# Altium footprint library SYNCBOX_V3I1.PcbLib: 251 footprints (part 10 of 16)
Each footprint in its own frame and in the unit in brackets; x right, y up, seen from the top. Pads: shape width x height; smd on the part's side, far side on the other; paste and mask are expansions set on the pad; w line width, h text height; cw(c..) or ccw(c..) is an arc to the next point about the centre after c.
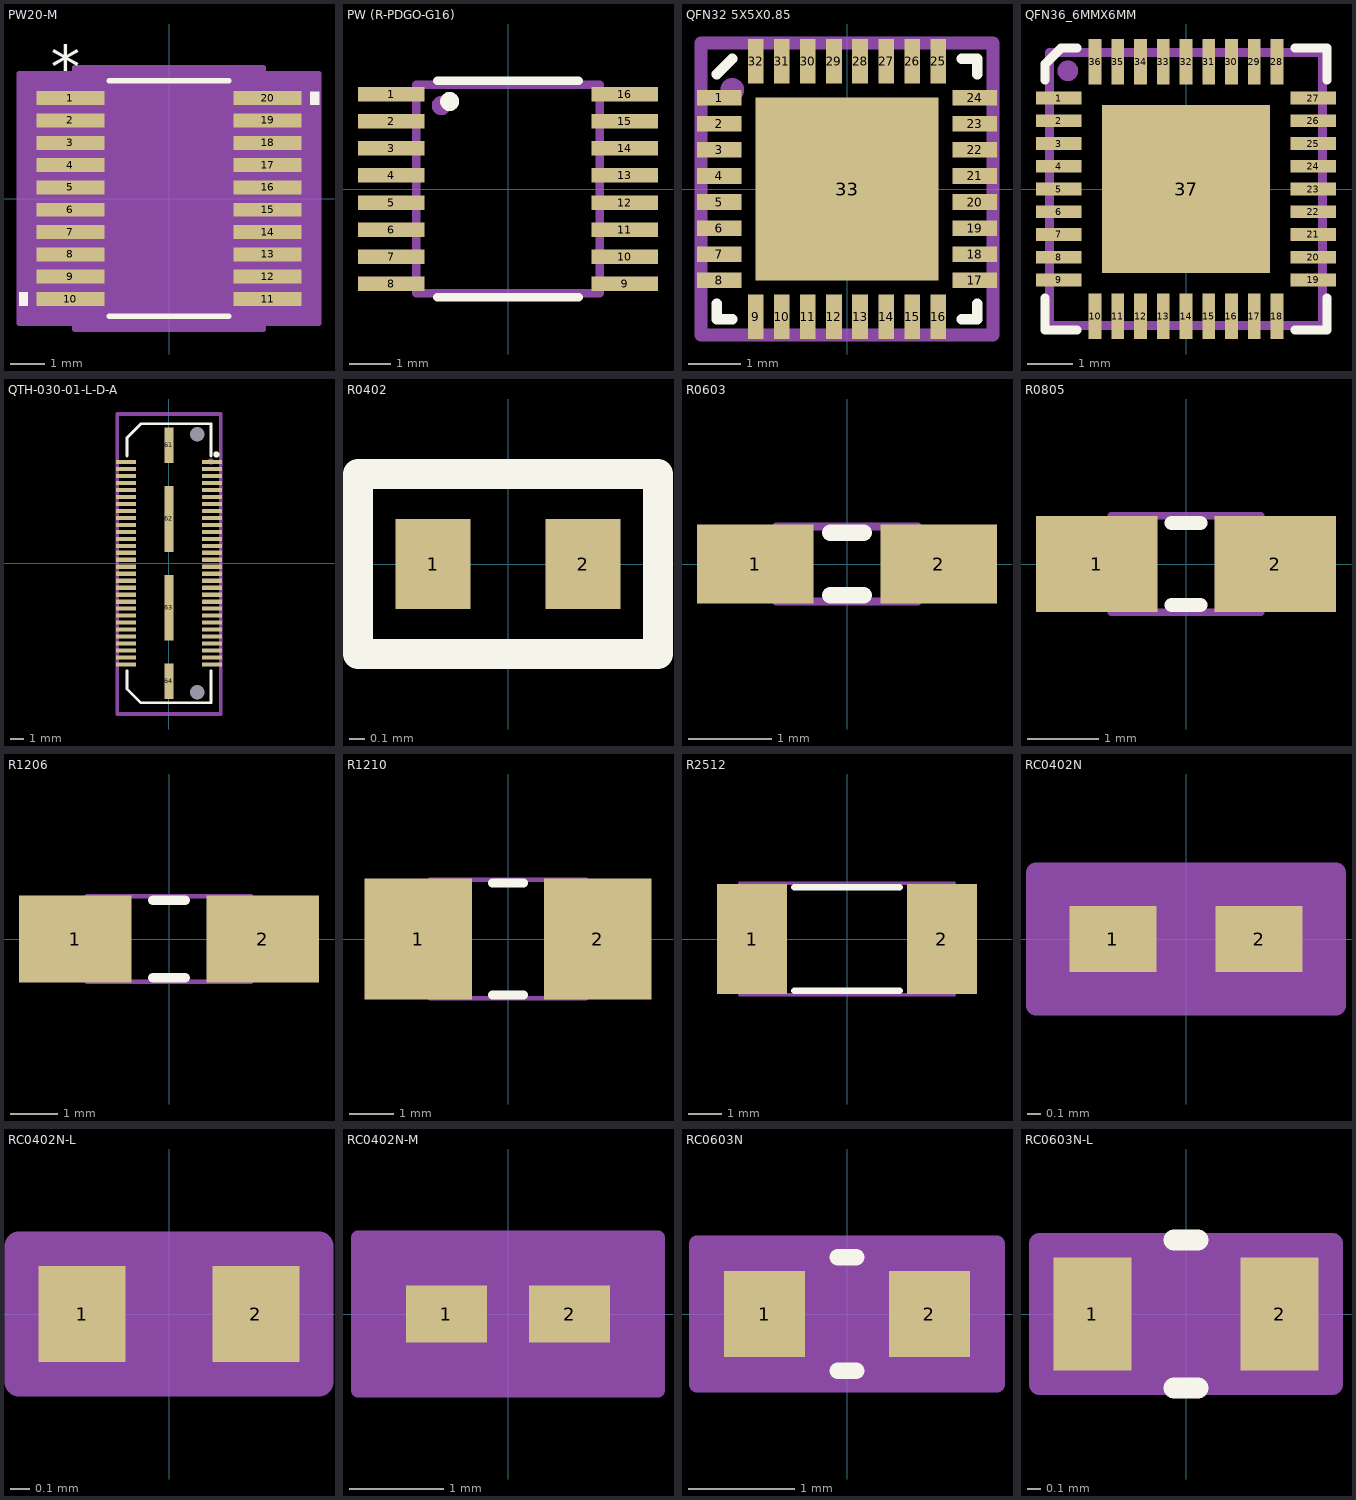
[diagram p9: the footprints below, top view; thin cyan lines are the x and y axes]

## PW20-M [mil]
pads (20):
  rect 78x16 smd paste+0 mask+0: 1(-113,115.16) 2(-113,89.57) 3(-113,63.98) 4(-113,38.39) 5(-113,12.8) 6(-113,-12.8) 7(-113,-38.39) 8(-113,-63.98) 9(-113,-89.57) 10(-113,-115.16) 11(113,-115.16) 12(113,-89.57) 13(113,-63.98) 14(113,-38.39) 15(113,-12.8) 16(113,12.8) 17(113,38.39) 18(113,63.98) 19(113,89.57) 20(113,115.16)
Top Overlay:
  region: -162,-107.66 -172,-107.66 -172,-122.66 -162,-122.66
  region: 162,122.66 172,122.66 172,107.66 162,107.66
  lines w6: -68.4,-135 68.4,-135 ; -68.4,135 68.4,135
  text "*" at -135.5,126.16 h50
Mechanical 13:
  lines w0: -12,130 ccw(c0,130) 12,130
  lines w1: -130,-121.16 -130,-109.16 -88.5,-109.16 -88.5,-121.16 -130,-121.16 ; -130,-95.57 -130,-83.57 -88.5,-83.57 -88.5,-95.57 -130,-95.57 ; -130,-69.98 -130,-57.98 -88.5,-57.98 -88.5,-69.98 -130,-69.98 ; -130,-44.39 -130,-32.39 -88.5,-32.39 -88.5,-44.39 -130,-44.39 ; -130,-18.8 -130,-6.8 -88.5,-6.8 -88.5,-18.8 -130,-18.8 ; -130,6.8 -130,18.8 -88.5,18.8 -88.5,6.8 -130,6.8 ; -130,32.39 -130,44.39 -88.5,44.39 -88.5,32.39 -130,32.39 ; -130,57.98 -130,69.98 -88.5,69.98 -88.5,57.98 -130,57.98 ; -130,83.57 -130,95.57 -88.5,95.57 -88.5,83.57 -130,83.57 ; -130,109.16 -130,121.16 -88.5,121.16 -88.5,109.16 -130,109.16 ; -88.5,-130 88.5,-130 88.5,130 -88.5,130 -88.5,-130 ; 88.5,-121.16 88.5,-109.16 130,-109.16 130,-121.16 88.5,-121.16 ; 88.5,-95.57 88.5,-83.57 130,-83.57 130,-95.57 88.5,-95.57 ; 88.5,-69.98 88.5,-57.98 130,-57.98 130,-69.98 88.5,-69.98 ; 88.5,-44.39 88.5,-32.39 130,-32.39 130,-44.39 88.5,-44.39 ; 88.5,-18.8 88.5,-6.8 130,-6.8 130,-18.8 88.5,-18.8 ; 88.5,6.8 88.5,18.8 130,18.8 130,6.8 88.5,6.8 ; 88.5,32.39 88.5,44.39 130,44.39 130,32.39 88.5,32.39 ; 88.5,57.98 88.5,69.98 130,69.98 130,57.98 88.5,57.98 ; 88.5,83.57 88.5,95.57 130,95.57 130,83.57 88.5,83.57 ; 88.5,109.16 88.5,121.16 130,121.16 130,109.16 88.5,109.16
  text "*" at -86,77 h50
Mechanical 15:
  region: -108.5,-143.16 -172,-143.16 -172,143.16 -108.5,143.16 -108.5,150 108.5,150 108.5,143.16 172,143.16 172,-143.16 108.5,-143.16 108.5,-150 -108.5,-150
  lines w6: -172,-143.16 -172,143.16 -108.5,143.16 -108.5,150 108.5,150 108.5,143.16 172,143.16 172,-143.16 108.5,-143.16 108.5,-150 -108.5,-150 -108.5,-143.16 -172,-143.16
3D body "PW20-M.step": height 47.09, standoff 0, extent -130,-130 130,130
3D body: height 10, standoff 0, extent 0,0 10,10

## PW (R-PDGO-G16) [mm]
pads (16):
  rect 1.6x0.35 smd mask+0.07: 1(-2.8,2.275) 2(-2.8,1.625) 3(-2.8,0.975) 4(-2.8,0.325) 5(-2.8,-0.325) 6(-2.8,-0.975) 7(-2.8,-1.625) 8(-2.8,-2.275) 9(2.8,-2.275) 10(2.8,-1.625) 11(2.8,-0.975) 12(2.8,-0.325) 13(2.8,0.325) 14(2.8,0.975) 15(2.8,1.625) 16(2.8,2.275)
Top Overlay:
  circle w0.254: c-1.4,2.1 r0.1
  lines w0.2: -1.7,-2.6 1.7,-2.6 ; -1.7,2.6 1.7,2.6
Mechanical 16:
  circle w0.254: c-1.6,2 r0.1
  lines w0.2: -2.2,-2.5 -2.2,2.5 2.2,2.5 2.2,-2.5 -2.2,-2.5
Mechanical 29:
  text ".Designator" at 0.7,0.5 h1
3D body "mtc16.stp": height 0.99, standoff -0.01, extent -3.198,-2.5 3.222,2.5

## QFN32 5X5X0.85 [mm]
pads (33):
  rect 0.85x0.3 smd mask+0.025: 1(-2.45,1.75) 2(-2.45,1.25) 3(-2.45,0.75) 4(-2.45,0.25) 5(-2.45,-0.25) 6(-2.45,-0.75) 7(-2.45,-1.25) 8(-2.45,-1.75) 17(2.45,-1.75) 18(2.45,-1.25) 19(2.45,-0.75) 20(2.45,-0.25) 21(2.45,0.25) 22(2.45,0.75) 23(2.45,1.25) 24(2.45,1.75)
  rect 0.3x0.85 smd mask+0.025: 9(-1.75,-2.45) 10(-1.25,-2.45) 11(-0.75,-2.45) 12(-0.25,-2.45) 13(0.25,-2.45) 14(0.75,-2.45) 15(1.25,-2.45) 16(1.75,-2.45) 25(1.75,2.45) 26(1.25,2.45) 27(0.75,2.45) 28(0.25,2.45) 29(-0.25,2.45) 30(-0.75,2.45) 31(-1.25,2.45) 32(-1.75,2.45)
  rect 3.5x3.5 smd paste-10 mask+0.025: 33(0,0)
Top Overlay:
  lines w0.2: -2.5,-2.2 -2.5,-2.5 -2.2,-2.5 ; -2.5,2.2 -2.2,2.5 ; 2.2,-2.5 2.5,-2.5 2.5,-2.2 ; 2.2,2.5 2.5,2.5 2.5,2.2
Top Paste:
  rectangle: -1.7,0.1 -0.1,1.7
  region: 0.1,1.7 0.1,0.1 1.7,0.1 1.7,1.7
  region: -0.1,-1.7 -0.1,-0.1 -1.7,-0.1 -1.7,-1.7
  region: 1.7,-0.1 0.1,-0.1 0.1,-1.7 1.7,-1.7
Mechanical 16:
  circle w0.254: c-2.2,1.9 r0.1
  lines w0.254: -2.8,-2.8 -2.8,2.8 2.8,2.8 2.8,-2.8 -2.8,-2.8
Mechanical 29:
  text ".Designator" at 0.5,-1.2 h1.2
3D body: height 0.9, standoff 0, extent -2.5,-2.5 2.5,2.5

## QFN36_6MMX6MM [mm]
pads (37):
  rect 1x0.28 smd mask+0.025: 1(-2.8,2) 2(-2.8,1.5) 3(-2.8,1) 4(-2.8,0.5) 5(-2.8,0) 6(-2.8,-0.5) 7(-2.8,-1) 8(-2.8,-1.5) 9(-2.8,-2) 19(2.8,-2) 20(2.8,-1.5) 21(2.8,-1) 22(2.8,-0.5) 23(2.8,0) 24(2.8,0.5) 25(2.8,1) 26(2.8,1.5) 27(2.8,2)
  rect 0.28x1 smd mask+0.025: 10(-2,-2.8) 11(-1.5,-2.8) 12(-1,-2.8) 13(-0.5,-2.8) 14(0,-2.8) 15(0.5,-2.8) 16(1,-2.8) 17(1.5,-2.8) 18(2,-2.8) 28(2,2.8) 29(1.5,2.8) 30(1,2.8) 31(0.5,2.8) 32(0,2.8) 33(-0.5,2.8) 34(-1,2.8) 35(-1.5,2.8) 36(-2,2.8)
  rect 3.7x3.7 smd paste-10 mask+0.025: 37(0,0)
Top Overlay:
  lines w0.2: -3.1,-2.4 -3.1,-3.1 -2.4,-3.1 ; -3.1,2.4 -3.1,2.75 -2.75,3.1 -2.4,3.1 ; 2.4,-3.1 3.1,-3.1 3.1,-2.4 ; 2.4,3.1 3.1,3.1 3.1,2.4
Top Paste:
  rectangle: -1.7,0.1 -0.1,1.7
  region: -0.1,-1.7 -0.1,-0.1 -1.7,-0.1 -1.7,-1.7
  region: 1.7,-0.1 0.1,-0.1 0.1,-1.7 1.7,-1.7
  region: 0.1,1.7 0.1,0.1 1.7,0.1 1.7,1.7
Mechanical 16:
  circle w0.254: c-2.6,2.6 r0.1
  lines w0.2: -3,-3 -3,3 3,3 3,-3 -3,-3
Mechanical 29:
  text ".Designator" at -1.2,-0.6 h1.2
3D body "QFN36 (6x6).step": height 0.9, standoff 0.01, extent -3.103,-3.103 3.102,3.102

## QTH-030-01-L-D-A [mm]
pads (66):
  rect 1.45x0.3 smd mask+0.025: 1(3.09,7.25) 2(-3.09,7.25) 3(3.09,6.75) 4(-3.09,6.75) 5(3.09,6.25) 6(-3.09,6.25) 7(3.09,5.75) 8(-3.09,5.75) 9(3.09,5.25) 10(-3.09,5.25) 11(3.09,4.75) 12(-3.09,4.75) 13(3.09,4.25) 14(-3.09,4.25) 15(3.09,3.75) 16(-3.09,3.75) 17(3.09,3.25) 18(-3.09,3.25) 19(3.09,2.75) 20(-3.09,2.75) 21(3.09,2.25) 22(-3.09,2.25) 23(3.09,1.75) 24(-3.09,1.75) 25(3.09,1.25) 26(-3.09,1.25) 27(3.09,0.75) 28(-3.09,0.75) 29(3.09,0.25) 30(-3.09,0.25) 31(3.09,-0.25) 32(-3.09,-0.25) 33(3.09,-0.75) 34(-3.09,-0.75) 35(3.09,-1.25) 36(-3.09,-1.25) 37(3.09,-1.75) 38(-3.09,-1.75) 39(3.09,-2.25) 40(-3.09,-2.25) 41(3.09,-2.75) 42(-3.09,-2.75) 43(3.09,-3.25) 44(-3.09,-3.25) 45(3.09,-3.75) 46(-3.09,-3.75) 47(3.09,-4.25) 48(-3.09,-4.25) 49(3.09,-4.75) 50(-3.09,-4.75) 51(3.09,-5.25) 52(-3.09,-5.25) 53(3.09,-5.75) 54(-3.09,-5.75) 55(3.09,-6.25) 56(-3.09,-6.25) 57(3.09,-6.75) 58(-3.09,-6.75) 59(3.09,-7.25) 60(-3.09,-7.25)
  rect 0.64x2.54 smd mask+0.025: 61(0,8.445) 64(0,-8.445)
  rect 0.64x4.7 smd mask+0.025: 62(0,3.175) 63(0,-3.175)
  round 0 hole 1.05 unplated: 65(2.03,-9.24) 66(2.03,9.24)
Top Overlay:
  circle w0.254: c3.4,7.8 r0.1
  lines w0.2: -3,-7.7 -3,-9 -2,-10 3,-10 3,-7.7 ; -3,7.7 -3,9 -2,10 3,10 3,7.7
Mechanical 16:
  circle w0.254: c3,7.3 r0.1
  lines w0.254: -3.7,-10.8 -3.7,10.7 3.7,10.7 3.7,-10.8 -3.7,-10.8
Mechanical 29:
  text ".Designator" at 1.2,0 h1.52
3D body "QTH-030-01-X-D-A.step": height 4.26, standoff -0.74, extent -3.55,-10.002 3.562,10

## R0402 [mm]
pads (2):
  rect 0.5x0.6 smd: 1(-0.5,0) 2(0.5,0)
Top Overlay:
  lines w0.2: -1,-0.6 -1,0.6 1,0.6 1,-0.6 -1,-0.6
Mechanical 16:
  lines w0.15: -1,-0.6 1,-0.6 1,0.6 -1,0.6 -1,-0.6
Mechanical 29:
  text ".Designator" at 2,0.2 h0.4
3D body "R0402.step": height 0.4, standoff 0, extent -0.5,-0.25 0.5,0.25

## R0603 [mm]
height 0.55
pads (2):
  rect 1.4x0.95 smd: 1(-1.1,0) 2(1.1,0)
Top Overlay:
  lines w0.2: -0.2,-0.375 0.2,-0.375 ; -0.2,0.375 0.2,0.375
Mechanical 13:
  lines w0.1: -0.85,-0.45 0.85,-0.45 0.85,0.45 -0.85,0.45 -0.85,-0.45
3D body: height 0.55, standoff 0, extent -0.85,-0.45 0.85,0.45

## R0805 [mm]
height 0.65
pads (2):
  rect 1.7x1.35 smd: 1(-1.25,0) 2(1.25,0)
Top Overlay:
  lines w0.2: -0.2,-0.575 0.2,-0.575 ; -0.2,0.575 0.2,0.575
Mechanical 13:
  lines w0.1: -1.05,-0.675 -1.05,0.675 1.05,0.675 1.05,-0.675 -1.05,-0.675
3D body: height 0.65, standoff 0, extent -1.05,-0.675 1.05,0.675

## R1206 [mm]
height 0.7
pads (2):
  rect 2.4x1.85 smd: 1(-2,0) 2(2,0)
Top Overlay:
  lines w0.2: -0.35,-0.825 0.35,-0.825 ; -0.35,0.825 0.35,0.825
Mechanical 13:
  lines w0.1: -1.75,-0.915 1.75,-0.915 1.75,0.915 -1.75,0.915 -1.75,-0.915
3D body: height 0.7, standoff 0, extent -1.75,-0.915 1.75,0.915

## R1210 [mm]
height 0.7
pads (2):
  rect 2.4x2.7 smd: 1(-2,0) 2(2,0)
Top Overlay:
  lines w0.2: -0.35,-1.25 0.35,-1.25 ; -0.35,1.25 0.35,1.25
Mechanical 13:
  lines w0.1: -1.75,-1.325 -1.75,1.325 1.75,1.325 1.75,-1.325 -1.75,-1.325
3D body: height 0.7, standoff 0, extent -1.75,-1.325 1.75,1.325

## R2512 [mm] "Chip Resistor, Body 6.3x3.2mm, IPC High Density"
height 0.7
pads (2):
  rect 2.1x3.3 smd: 1(-2.85,0) 2(2.85,0)
Top Overlay:
  lines w0.2: -1.575,-1.55 1.575,-1.55 ; -1.575,1.55 1.575,1.55
Mechanical 13:
  lines w0.1: -3.225,-1.675 -3.225,1.675 3.225,1.675 3.225,-1.675 -3.225,-1.675
3D body: height 0.9, standoff 0, extent -3.225,-1.675 3.225,1.675

## RC0402N [mm]
pads (2):
  rect 0.656x0.5 smd paste+0 mask+0: 1(-0.553,0) 2(0.553,0)
Mechanical 13:
  lines w0.025: -0.525,-0.25 -0.525,0.25 ; -0.525,-0.25 0.525,-0.25 ; -0.525,-0.25 -0.225,-0.25 -0.225,0.25 -0.525,0.25 ; -0.525,-0.25 -0.525,0.25 ; -0.525,0.25 0.525,0.25 ; 0.525,-0.25 0.525,0.25 ; 0.525,-0.25 0.525,0.25 ; 0.525,-0.25 0.225,-0.25 0.225,0.25 0.525,0.25
Mechanical 15:
  region: 1.135,-0.504 -1.135,-0.504 -1.135,0.504 1.135,0.504
  lines w0.152: -1.135,-0.504 1.135,-0.504 1.135,0.504 -1.135,0.504 -1.135,-0.504
3D body: height 0.25, standoff 0, extent 0,0 0.254,0.254
3D body "RC0402N.step": height 0.71, standoff 0, extent -0.525,-0.25 0.525,0.25

## RC0402N-L [mm]
pads (2):
  rect 0.452x0.5 smd paste+0 mask+0: 1(-0.451,0) 2(0.451,0)
Mechanical 13:
  lines w0.025: -0.525,-0.25 -0.525,0.25 ; -0.525,-0.25 0.525,-0.25 ; -0.525,-0.25 -0.225,-0.25 -0.225,0.25 -0.525,0.25 ; -0.525,-0.25 -0.525,0.25 ; -0.525,0.25 0.525,0.25 ; 0.525,-0.25 0.525,0.25 ; 0.525,-0.25 0.525,0.25 ; 0.525,-0.25 0.225,-0.25 0.225,0.25 0.525,0.25
Mechanical 15:
  region: 0.779,-0.352 -0.779,-0.352 -0.779,0.352 0.779,0.352
  lines w0.152: -0.779,-0.352 0.779,-0.352 0.779,0.352 -0.779,0.352 -0.779,-0.352
3D body "RC0402N-L.step": height 0.71, standoff 0, extent -0.525,-0.25 0.525,0.25
3D body: height 0.25, standoff 0, extent 0,0 0.254,0.254

## RC0402N-M [mm]
pads (2):
  rect 0.859x0.602 smd paste+0 mask+0: 1(-0.654,0) 2(0.654,0)
Mechanical 13:
  lines w0.025: -0.525,-0.25 -0.525,0.25 ; -0.525,-0.25 0.525,-0.25 ; -0.525,-0.25 -0.225,-0.25 -0.225,0.25 -0.525,0.25 ; -0.525,-0.25 -0.525,0.25 ; -0.525,0.25 0.525,0.25 ; 0.525,-0.25 0.525,0.25 ; 0.525,-0.25 0.525,0.25 ; 0.525,-0.25 0.225,-0.25 0.225,0.25 0.525,0.25
Mechanical 15:
  region: 1.592,-0.809 -1.592,-0.809 -1.592,0.809 1.592,0.809
  lines w0.152: -1.592,-0.809 1.592,-0.809 1.592,0.809 -1.592,0.809 -1.592,-0.809
3D body: height 0.25, standoff 0, extent 0,0 0.254,0.254
3D body "RC0402N-M.step": height 0.71, standoff 0, extent -0.525,-0.25 0.525,0.25

## RC0603N [mil]
pads (2):
  rect 30x32 smd paste+0 mask+0: 1(-30.5,0) 2(30.5,0)
Top Overlay:
  lines w6: -3.39,-21 3.39,-21 ; -3.39,21 3.39,21
Mechanical 13:
  lines w1: -31.5,-16 -31.5,16 ; -31.5,-16 -15.5,-16 -15.5,16 -31.5,16 ; -31.5,-16 31.5,-16 ; -31.5,-16 -31.5,16 ; -31.5,16 31.5,16 ; 31.5,-16 15.5,-16 15.5,16 31.5,16 ; 31.5,-16 31.5,16 ; 31.5,-16 31.5,16
Mechanical 15:
  region: 55.5,-26 -55.5,-26 -55.5,26 55.5,26
  lines w6: -55.5,-26 -55.5,26 55.5,26 55.5,-26 -55.5,-26
3D body: height 10, standoff 0, extent 0,0 10,10
3D body "RC0603N.stp": height 27.99, standoff 0, extent -31.49,-15.98 31.5,15.99

## RC0603N-L [mil]
pads (2):
  rect 22x32 smd paste+0 mask+0: 1(-26.5,0) 2(26.5,0)
Top Overlay:
  lines w6: -3.39,-21 3.39,-21 ; -3.39,21 3.39,21
Mechanical 13:
  lines w1: -31.5,-16 -31.5,16 ; -31.5,-16 31.5,-16 ; -31.5,-16 -15.5,-16 -15.5,16 -31.5,16 ; -31.5,-16 -31.5,16 ; -31.5,16 31.5,16 ; 31.5,-16 31.5,16 ; 31.5,-16 31.5,16 ; 31.5,-16 15.5,-16 15.5,16 31.5,16
Mechanical 15:
  region: 41.5,-20 -41.5,-20 -41.5,20 41.5,20
  lines w6: -41.5,-20 41.5,-20 41.5,20 -41.5,20 -41.5,-20
3D body "RC0603N-L.stp": height 27.99, standoff 0, extent -31.49,-15.98 31.5,15.99
3D body: height 10, standoff 0, extent 0,0 10,10